# Altium integrated library Passives.IntLib: 8 symbols
Pins are listed as number, name and electrical type; pins without a type are passive.

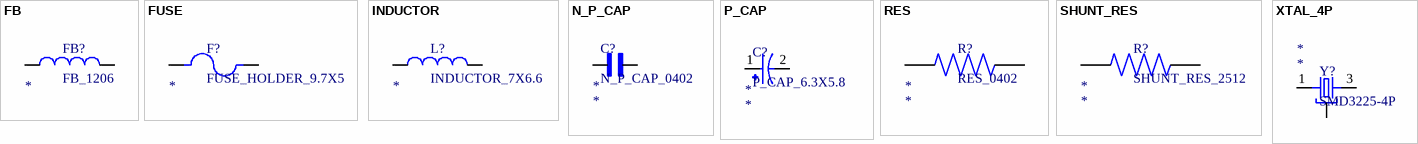
[diagram p0: symbols FB to XTAL_4P]

## FB
designator FB?
GENERIC FERRITE BEAD; LCSC Part Number: *; Idc (Max): *; DCR (Max): *; Tolerance: *; MF: *; MPN: *; Current Rating: *; Value: *
footprint FB_1206 (3216 Metric)
pins: 1, 2

## FUSE
designator F?
GENERIC FUSE; Rated Current: *; Rated Voltage: *; LCSC Part Number: *; Response Time: *; Breaking Capacity: *; Fuse Type: *; MF: *; MPN: *
footprint FUSE_HOLDER_9.7X5
footprint FUSE_HOLDER_3557-2
footprint FUSE_HOLDER_3587-20
footprint FUSE_HOLDER_3557-20
pins: 1, 2

## INDUCTOR
designator L?
GENERIC INDUCTOR; MF: *; LCSC Part Number: *; Irms: *; DCR (Max): *; Isat: *; MPN: *; Tolerance: *; Value: *
footprint INDUCTOR_7X6.6
footprint INDUCTOR_SRN6045TA-3R3Y
pins: 1, 2

## N_P_CAP
designator C?
GENERIC NON-POLARIZED CAP; LCSC Part Number: *; Tolerance: *; MF: *; ESR: *; MPN: *; Temperature Coefficient: *; Rated Voltage: *; Value: *
footprint N_P_CAP_0402
footprint N_P_CAP_0603
footprint N_P_CAP_0805
footprint N_P_CAP_1206
footprint N_P_CAP_0201
footprint N_P_CAP_1210
pins: 1, 2

## P_CAP
designator C?
GENERIC POLARIZED CAP; MF: *; MPN: *; LCSC Part Number: *; Tolerance: *; ESR: *; Capacitor Type: *; Ripple Current: *; Rated Voltage: *; Value: *
footprint P_CAP_6.3X5.8
footprint P_CAP_10X10.2
footprint P_CAP_6.3X7.7
footprint P_CAP_8X10.2
pins: 1 A, 2 K

## RES
designator R?
GENERIC RES; Power Rating: *; MPN: *; Rated Voltage: *; Temperature Coefficient: *; LCSC Part Number: *; Tolerance: *; Value: *
footprint RES_0402
footprint RES_0603
footprint RES_0805
footprint RES_1206
pins: 1, 2

## SHUNT_RES
designator R?
GENERIC SHUNT RES; Power Rating: *; MPN: *; Rated Voltage: *; Temperature Coefficient: *; LCSC Part Number: *; Tolerance: *; Value: *
footprint SHUNT_RES_2512 (6432 Metric)
pins: 1, 2

## XTAL_4P
designator Y?
GENERIC PASSIVE CRYSTAL; MF: *; ESR: *; LCSC Part Number: *; Load Capacitance: *; Frequency Tolerance: *; Frequency: *; MPN: *
footprint SMD3225-4P (OSCCC320X250X60N)
pins: 1, 2 GND, 3, 4 GND